# EAGLE library part DMHC3025LSD (library madhu)
30V COMPLEMENTARY ENHANCEMENT MODE MOSFET H-BRIDGE
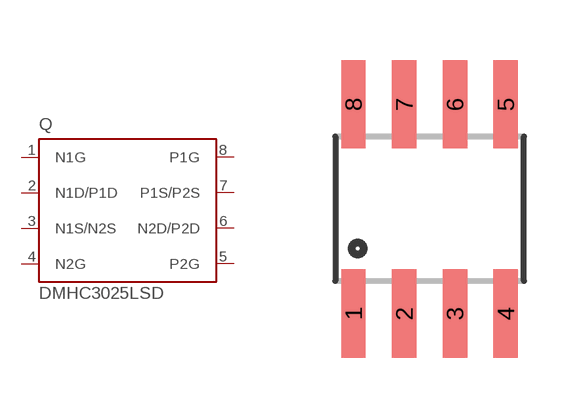
[diagram p39: symbol with the pads of SOIC-8; footprint SOIC-8]

Designator prefix Q

## DMHC3025LSD  [SOIC-8]
1  N1G  in
2  N1D/P1D  oc
3  N1S/N2S  in
4  N2G  in
5  P2G  in
6  N2D/P2D  oc
7  P1S/P2S  in
8  P1G  in

## Footprint SOIC-8 (pad centres in mm)
Small Outline Package Fits JEDEC packages (narrow SOIC-8)
smd 0.61 x 2.21: 1 -1.905,-2.616; 2 -0.635,-2.616; 3 0.635,-2.616; 4 1.905,-2.616; 5 1.905,2.616; 6 0.635,2.616; 7 -0.635,2.616; 8 -1.905,2.616